# Altium footprint library FootPrintLib_0.PcbLib: 266 footprints (part 15 of 17)
Each footprint in its own frame and in the unit in brackets; x right, y up, seen from the top. Pads: shape width x height; smd on the part's side, far side on the other; paste and mask are expansions set on the pad; w line width, h text height; cw(c..) or ccw(c..) is an arc to the next point about the centre after c.
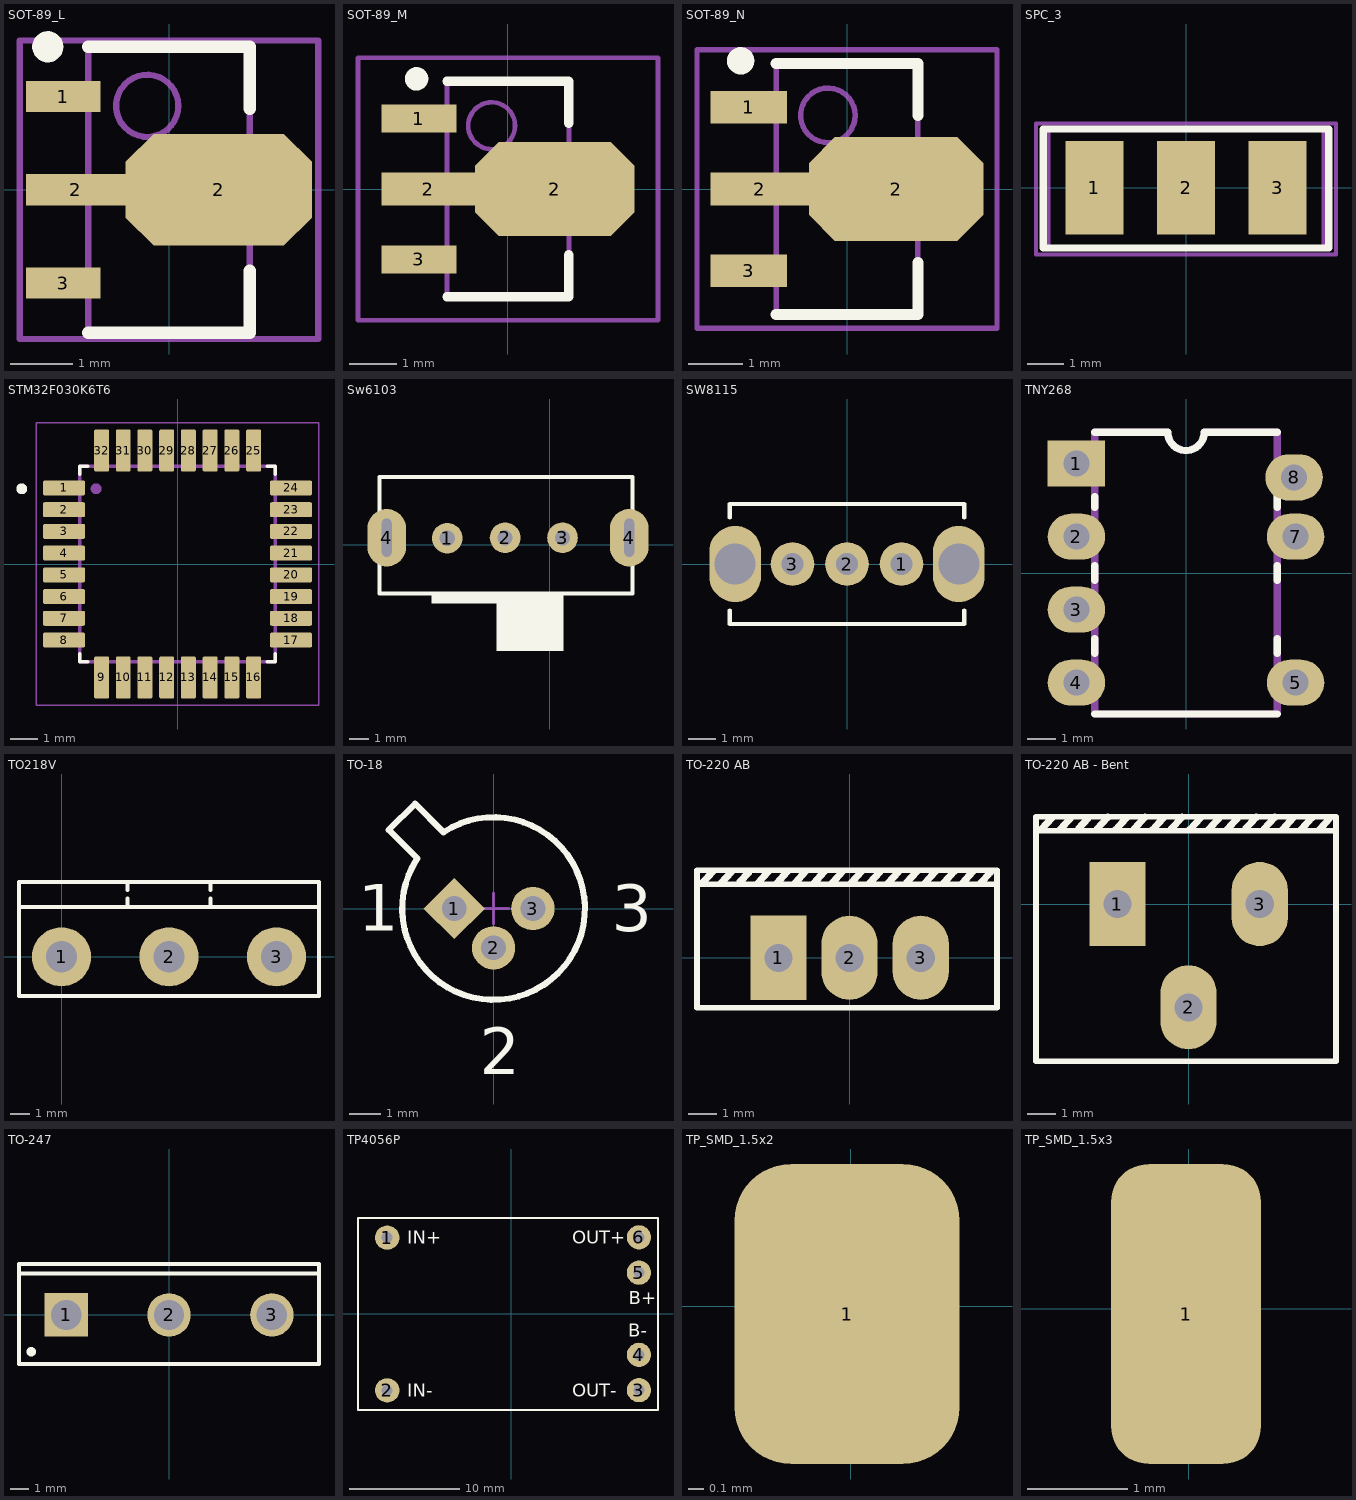
[diagram p14: the footprints below, top view; thin cyan lines are the x and y axes]

## SOT-89_L [mm] "SOT89, 3-Leads, Body 4.6x2.6 mm, Pitch 1.5mm, Lead Span 4.1mm, IPC High Density"
height 1.7
pads (4):
  rect 1.2x0.5 smd: 1(-1.7,1.5) 3(-1.7,-1.5)
  rect 1.6x0.5 smd: 2(-1.5,0)
  oct 3x1.8 smd: 2(0.8,0)
Top Overlay:
  circle w0.25: c-1.95,2.3 r0.125
  lines w0.2: -1.3,-2.3 1.3,-2.3 1.3,-1.3 ; -1.3,2.3 1.3,2.3 1.3,1.3
Mechanical 13:
  circle w0.1: c-0.35,1.35 r0.5
  lines w0.1: -1.3,-2.3 1.3,-2.3 1.3,2.3 -1.3,2.3 -1.3,-2.3
Mechanical 15:
  lines w0.1: -0.5,0 0.5,0 ; 0,-0.5 0,0.5 ; -2.4,-2.4 2.4,-2.4 2.4,2.4 -2.4,2.4 -2.4,-2.4
3D body "User Library-SOT-89-2.STEP": height 1.43, standoff 0.03, extent -2.058,-2.25 1.877,2.25

## SOT-89_M [mm] "SOT89, 3-Leads, Body 4.6x2.6 mm, Pitch 1.5mm, Lead Span 4.1mm, IPC Low Density"
height 1.7
pads (4):
  rect 1.6x0.6 smd: 1(-1.9,1.5) 3(-1.9,-1.5)
  rect 2x0.7 smd: 2(-1.7,0)
  oct 3.4x2 smd: 2(1,0)
Top Overlay:
  circle w0.25: c-1.95,2.35 r0.125
  lines w0.2: -1.3,-2.3 1.3,-2.3 1.3,-1.4 ; -1.3,2.3 1.3,2.3 1.3,1.4
Mechanical 13:
  circle w0.1: c-0.35,1.35 r0.5
  lines w0.1: -1.3,-2.3 1.3,-2.3 1.3,2.3 -1.3,2.3 -1.3,-2.3
Mechanical 15:
  lines w0.1: -0.5,0 0.5,0 ; 0,-0.5 0,0.5 ; -3.2,-2.8 3.2,-2.8 3.2,2.8 -3.2,2.8 -3.2,-2.8
3D body "User Library-SOT-89-2.STEP": height 1.43, standoff 0.03, extent -2.261,-2.275 1.674,2.225

## SOT-89_N [mm] "SOT89, 3-Leads, Body 4.6x2.6 mm, Pitch 1.5mm, Lead Span 4.1mm, IPC Medium Density"
height 1.7
pads (4):
  rect 1.4x0.6 smd: 1(-1.8,1.5) 3(-1.8,-1.5)
  rect 1.8x0.6 smd: 2(-1.6,0)
  oct 3.2x1.9 smd: 2(0.9,0)
Top Overlay:
  circle w0.25: c-1.95,2.35 r0.125
  lines w0.2: -1.3,-2.3 1.3,-2.3 1.3,-1.35 ; -1.3,2.3 1.3,2.3 1.3,1.35
Mechanical 13:
  circle w0.1: c-0.35,1.35 r0.5
  lines w0.1: -1.3,-2.3 -1.3,2.3 1.3,2.3 1.3,-2.3 -1.3,-2.3
Mechanical 15:
  lines w0.1: -0.5,0 0.5,0 ; 0,-0.5 0,0.5 ; -2.75,-2.55 -2.75,2.55 2.75,2.55 2.75,-2.55 -2.75,-2.55
3D body "User Library-SOT-89-2.STEP": height 1.43, standoff 0.03, extent -2.083,-2.25 1.852,2.25

## SPC_3 [mm] "SMD Pad connector, pitch 2.54 mm,"
height 8.54
pads (3):
  rect 1.6x2.6 smd: 1(-2.54,0) 2(0,0) 3(2.54,0)
Top Overlay:
  lines w0.2: -3.96,-1.676 3.96,-1.676 3.96,1.626 -3.96,1.626 -3.96,-1.676
Mechanical 11:
  lines w0.1: -3.81,-1.676 -3.81,1.626 3.81,1.626 3.81,-1.676 -3.81,-1.676
Mechanical 13:
  lines w0.1: -3.96,-1.676 -3.96,1.626 3.96,1.626 3.96,-1.676 -3.96,-1.676
Mechanical 15:
  lines w0.1: -0.5,0 0.5,0 ; 0,-0.5 0,0.5 ; -4.16,-1.854 -4.16,1.778 4.16,1.778 4.16,-1.854 -4.16,-1.854

## STM32F030K6T6 [mm]
pads (32):
  rrect25% 1.56x0.55 smd: 1(-4.18,2.8) 2(-4.18,2) 3(-4.18,1.2) 4(-4.18,0.4) 5(-4.18,-0.4) 6(-4.18,-1.2) 7(-4.18,-2) 8(-4.18,-2.8) 17(4.18,-2.8) 18(4.18,-2) 19(4.18,-1.2) 20(4.18,-0.4) 21(4.18,0.4) 22(4.18,1.2) 23(4.18,2) 24(4.18,2.8)
  rrect25% 0.55x1.56 smd: 9(-2.8,-4.18) 10(-2,-4.18) 11(-1.2,-4.18) 12(-0.4,-4.18) 13(0.4,-4.18) 14(1.2,-4.18) 15(2,-4.18) 16(2.8,-4.18) 25(2.8,4.18) 26(2,4.18) 27(1.2,4.18) 28(0.4,4.18) 29(-0.4,4.18) 30(-1.2,4.18) 31(-2,4.18) 32(-2.8,4.18)
Top Overlay:
  circle w0.2: c-5.74,2.77 r0.1
  lines w0.127: -3.6,-3.3 -3.6,-3.6 -3.3,-3.6 ; -3.6,3.3 -3.6,3.6 -3.3,3.6 ; 3.3,-3.6 3.6,-3.6 3.6,-3.3 ; 3.3,3.6 3.6,3.6 3.6,3.3
Mechanical 13:
  circle w0.2: c-3,2.77 r0.1
  lines w0.127: -3.6,-3.6 3.6,-3.6 3.6,3.6 -3.6,3.6 -3.6,-3.6
Mechanical 15:
  lines w0.05: -5.21,-5.21 5.21,-5.21 5.21,5.21 -5.21,5.21 -5.21,-5.21
3D body "stm32f030k6t6.stp": height 1.48, standoff 0, extent -4.5,-4.48 4.5,4.52

## Sw6103 [mm]
pads (5):
  round 1.6 hole 0.8: 1(-5.351,0.356) 2(-2.337,0.381) 3(0.66,0.381)
  oval 2x3 hole 0.508 slot 2 at 90 deg: 4(-8.509,0.381) 4(4.14,0.381)
Top Overlay:
  rectangle: -2.794,-5.54 0.706,-2.54
  rectangle: -6.167,-3.048 -2.667,-2.548
  lines w0.203: -8.89,-2.54 4.318,-2.54 4.318,3.556 -8.89,3.556 -8.89,-2.54
3D body "User Library-SLIDE SWITCH SS12F23.STEP": height 5.75, standoff -3.35, extent -8.788,-8.939 4.212,3.961

## SW8115 [mm] "Subminiator SPDT switch"
pads (5):
  round 1.6 hole 0.8: 1(2,0) 2(0,0) 3(-2,0)
  oval 1.9x2.8 hole 1.5: ""(-4.1,0) ""(4.1,0)
Top Overlay:
  lines w0.15: -4.3,-1.7 -4.3,-2.2 4.3,-2.2 4.3,-1.7 ; -4.3,1.7 -4.3,2.2 4.3,2.2 4.3,1.7
3D body "User Library-OS102011MS2QN1.step": height 8.05, standoff -3.36, extent -4.249,-2.059 4.351,2.241

## TNY268 [mm]
height 4.6
pads (7):
  rect 2x1.6 hole 0.9: 1(-3.81,3.81)
  oval 2x1.6 hole 0.9: 2(-3.81,1.27) 3(-3.81,-1.27) 4(-3.81,-3.81) 5(3.81,-3.81) 7(3.81,1.27) 8(3.759,3.327)
Top Overlay:
  lines w0.254: -3.175,-4.9 3.175,-4.9 ; -3.175,-2.794 -3.175,-2.286 ; -3.175,-0.254 -3.175,0.254 ; -3.175,2.286 -3.175,2.667 ; -3.175,4.9 -0.635,4.9 ccw(c0,4.9) 0.635,4.9 3.175,4.9 ; 3.175,-2.794 3.175,-2.286 ; 3.175,-0.254 3.175,0.254 ; 3.175,2.286 3.175,2.794
Mechanical 1:
  lines w0.254: -3.175,-4.9 3.175,-4.9 3.175,4.9 0.635,4.9 cw(c0,4.9) -0.635,4.9 -3.175,4.9 -3.175,-4.9
3D body "PDIP-8B_PWI.step": height 4.75, standoff -2.04, extent -4.064,-4.724 4.318,4.724

## TO218V [mm]
pads (3):
  round 3 hole 1.6: 1(0,0) 2(5.461,0) 3(10.922,0)
Top Overlay:
  lines w0.2: -2.159,2.54 13.081,2.54 ; 3.344,2.54 3.344,2.963 ; 3.344,3.387 3.344,3.81 ; 7.578,2.54 7.578,2.963 ; 7.578,3.387 7.578,3.81 ; -2.159,-2 13.081,-2 13.081,3.81 -2.159,3.81 -2.159,-2

## TO-18 [mm] "Can; 3 Leads; Pin Circle Dia. 2.54 mm; Lead Dia. 0.48 mm (max)"
height 5.33
pads (3):
  rect 1.4x1.4 hole 0.8 rot 45: 1(-1.27,0)
  round 1.4 hole 0.8: 2(0,-1.27) 3(1.27,0)
Top Overlay:
  lines w0.2: -3.386,2.537 -2.537,3.386 -1.618,2.467 cw(c0,0) -2.467,1.618 -3.386,2.537
  text "1" at -4.38,-0.719 h1.5
  text "2" at -0.443,-5.355 h1.5
  text "3" at 3.812,-0.742 h1.5
Mechanical 15:
  lines w0.1: -0.5,0 0.5,0 ; 0,-0.5 0,0.5
3D body "TO-18.STEP": height 5.05, standoff -2.55, extent -3.041,-2.725 2.75,3.066

## TO-220 AB [mm] "TO-220AB, Thru-Hole, Vertical, Heatsink Mounted; 3 In-Line Leads; Pitch 2.54 mm"
height 19.7
pads (3):
  rect 2x3 hole 1: 1(-2.54,0)
  oval 2x3 hole 1: 2(0,0) 3(2.54,0)
Top Overlay:
  lines w0.2: -5.42,2.62 5.23,2.62 ; -5.44,-1.78 -5.44,3.12 5.26,3.12 5.26,-1.78 -5.44,-1.78
  lines w0.254: -5.25,2.66 -4.866,3.086 ; -4.588,2.65 -4.204,3.076 ; -3.926,2.682 -3.58,3.066 ; -3.264,2.67 -2.881,3.096 ; -2.603,2.65 -2.219,3.076 ; -1.941,2.67 -1.557,3.096 ; -1.279,2.65 -0.895,3.076 ; -0.617,2.67 -0.233,3.096 ; 0.045,2.65 0.429,3.076 ; 0.707,2.65 1.09,3.076 ; 1.369,2.65 1.752,3.076 ; 2.03,2.67 2.414,3.096 ; 2.692,2.67 3.076,3.096 ; 3.354,2.66 3.738,3.086 ; 4.016,2.651 4.4,3.077 ; 4.678,2.663 5.028,3.052
3D body "TO-220AB-ST.stp": height 19.5, standoff -9.2, extent -5.367,-1.663 5.283,3.137

## TO-220 AB - Bent [mm] "TO-220AB, Thru-Hole, Vertical, Heatsink Mounted; 3 In-Line Leads; Pitch 2.54 mm"
height 19.7
pads (3):
  rect 2x3 hole 1: 1(-2.54,0)
  oval 2x3 hole 1: 2(0,-3.683) 3(2.54,0)
Top Overlay:
  lines w0.2: -5.42,2.62 5.23,2.62 ; -5.44,-5.613 -5.44,3.12 5.26,3.12 5.26,-5.613 -5.44,-5.613
  lines w0.254: -5.25,2.66 -4.866,3.086 ; -4.588,2.65 -4.204,3.076 ; -3.926,2.682 -3.58,3.066 ; -3.264,2.67 -2.881,3.096 ; -2.603,2.65 -2.219,3.076 ; -1.941,2.67 -1.557,3.096 ; -1.279,2.65 -0.895,3.076 ; -0.617,2.67 -0.233,3.096 ; 0.045,2.65 0.429,3.076 ; 0.707,2.65 1.09,3.076 ; 1.369,2.65 1.752,3.076 ; 2.03,2.67 2.414,3.096 ; 2.692,2.67 3.076,3.096 ; 3.354,2.66 3.738,3.086 ; 4.016,2.651 4.4,3.077 ; 4.678,2.663 5.028,3.052
3D body "User Library-TO-220-Vert_w_bent_center_lead.step": height 21.3, standoff -7.48, extent -4.975,-2.883 4.925,2.362

## TO-247 [mm] "SIP with Mounting Hole; 3 Leads; Body 20 x 15.6 x 5 mm (typ); Pitch 5.45 mm"
height 24.6
pads (3):
  rect 2.3x2.3 hole 1.6: 1(-5.45,0)
  round 2.3 hole 1.6: 2(0,0) 3(5.45,0)
Top Overlay:
  circle w0.25: c-7.3,-1.95 r0.125
  lines w0.2: -7.95,2.2 7.95,2.2 ; -7.95,-2.6 7.95,-2.6 7.95,2.7 -7.95,2.7 -7.95,-2.6
Mechanical 13:
  lines w0.1: -7.95,-2.6 7.95,-2.6 7.95,2.7 -7.95,2.7 -7.95,-2.6
Mechanical 15:
  lines w0.1: -0.5,0 0.5,0 ; 0,-0.5 0,0.5
3D body "TO-247.STEP": height 24, standoff -15, extent -7.674,-3.15 7.826,1.85

## TP4056P [mm] "Module TP4056P 28/8x17/4mm"
height 4
pads (6):
  round 2.2 hole 1: 1(-11.25,6.925) 2(-11.25,-6.925) 3(11.575,-6.9) 4(11.575,-3.7) 5(11.575,3.75) 6(11.575,6.95)
Top Overlay:
  lines w0.2: -13.9,-8.7 -13.9,3.775 -13.9,8.7 13.3,8.7 13.3,-8.7 -10.25,-8.7 -13.9,-8.7
  text "OUT+" at 5.525,6.35 h1.2
  text "OUT-" at 5.525,-7.5 h1.2
  text "IN+" at -9.45,6.35 h1.2
  text "IN-" at -9.45,-7.5 h1.2
  text "B+" at 10.65,0.875 h1.2
  text "B-" at 10.625,-2.075 h1.2
3D body "Lipo Charger - With Load Protection.stp": height 10.28, standoff 6, extent -13.772,-8.547 13.132,8.547
3D body "61300111121.stp": height 8.77, standoff -2.77, extent -12.522,5.715 -9.982,8.255
3D body "61300111121.stp": height 8.77, standoff -2.77, extent -12.497,-8.229 -9.957,-5.689
3D body "61300111121.stp": height 8.77, standoff -2.77, extent 10.363,-8.255 12.903,-5.715
3D body "61300111121.stp": height 8.77, standoff -2.77, extent 10.338,-5.029 12.878,-2.489
3D body "61300111121.stp": height 8.77, standoff -2.77, extent 10.338,2.489 12.878,5.029
3D body "61300111121.stp": height 8.77, standoff -2.77, extent 10.338,5.715 12.878,8.255

## TP_SMD_1.5x2 [mm]
pads (1):
  rrect50% 1.5x2 smd: 1(-0.025,-0.051)

## TP_SMD_1.5x3 [mm]
pads (1):
  rrect50% 1.5x3 smd: 1(-0.025,-0.051)